# Altium schematic symbol library R15-100B.SchLib: 1 symbol
Pins are listed as number, name and electrical type; pins without a type are passive.

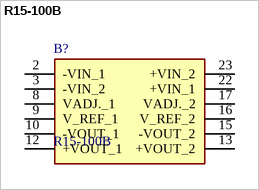
[diagram p0: symbol R15-100B]

## R15-100B
designator B?
Recom 5W Isolated DC-DC Converter, Vin 14  17 V dc, Vout 55  135V dc, I/O isolation 3000V dc; Manufacturer_Name: RECOM Power; Geometry.Height: 9.9mm; Mouser Part Number: 919-R15-100B; Mouser Price/Stock: https://www.mouser.co.uk/ProductDetail/RECOM-Power/R15-100B?qs=3sBZtWOgbidQ9DaE4LFYPA%3D%3D; Manufacturer_Part_Number: R15-100B; Datasheet Link: https://recom-power.com/pdf/Innoline/Rxx-B.pdf
footprint R15100B
pins: 2 -VIN_1, 3 -VIN_2, 8 VADJ._1, 9 V_REF_1, 10 -VOUT_1, 12 +VOUT_1, 13 +VOUT_2, 15 -VOUT_2, 16 V_REF_2, 17 VADJ._2, 22 +VIN_1, 23 +VIN_2